# Altium schematic symbol library ArduinoMega.SchLib: 1 symbol
Pins are listed as number, name and electrical type; pins without a type are passive.

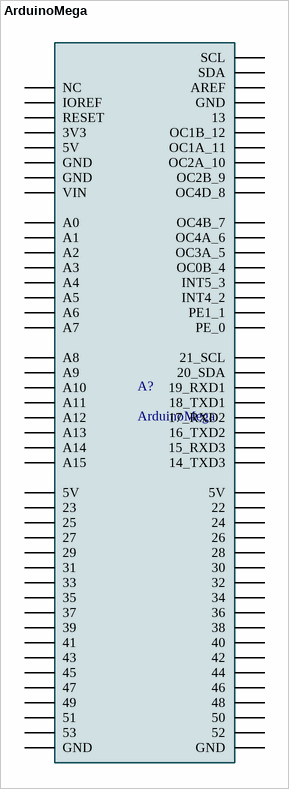
[diagram p0: symbol ArduinoMega]

## ArduinoMega
designator A?
Arduino Mega 2560 Rev3. ATmega2560 Microcontroller Mega Development Board 16MHz CPU 8KB RAM 4KB/256KB EEPROM/Flash; MP: A000067; MF: Arduino; Package: Non-Standard Arduino; Price: None; Check_prices: https://www.snapeda.com/parts/A000067/Arduino/view-part/?ref=eda; Value: *; SnapEDA_Link: https://www.snapeda.com/parts/A000067/Arduino/view-part/?ref=snap; Availability: In Stock; Purchase-URL: https://pricing.snapeda.com/search?q=A000067&ref=eda
footprint ArduinoMega
pins: 0 PE_0, 1 PE1_1, 2 INT4_2, 3 INT5_3, 3V3, 4 OC0B_4, 5 OC3A_5, 5V, 5V, 5V, 6 OC4A_6, 7 OC4B_7, 8 OC4D_8, 9 OC2B_9, 10 OC2A_10, 11 OC1A_11, 12 OC1B_12, 13, 14 14_TXD3, 15 15_RXD3, 16 16_TXD2, 17 17_RXD2, 18 18_TXD1, 19 19_RXD1, 20 20_SDA, 21 21_SCL, 22, 23, 24, 25, 26, 27, 28, 29, 30, 31, 32, 33, 34, 35, 36, 37, 38, 39, 40, 41, 42, 43, 44, 45, 46, 47, 48, 49, 50, 51, 52, 53, AD0 A0, AD1 A1, AD2 A2, AD3 A3, AD4 A4, AD5 A5, AD6 A6, AD7 A7, AD8 A8, AD9 A9, AD10 A10, AD11 A11, AD12 A12, AD13 A13, AD14 A14, AD15 A15, AREF, GND, GND, GND, GND, GND, IOREF, NC, RESET, SCL, SDA, VIN